# EAGLE library part SN74HC595DR (library SN74HC595DR)
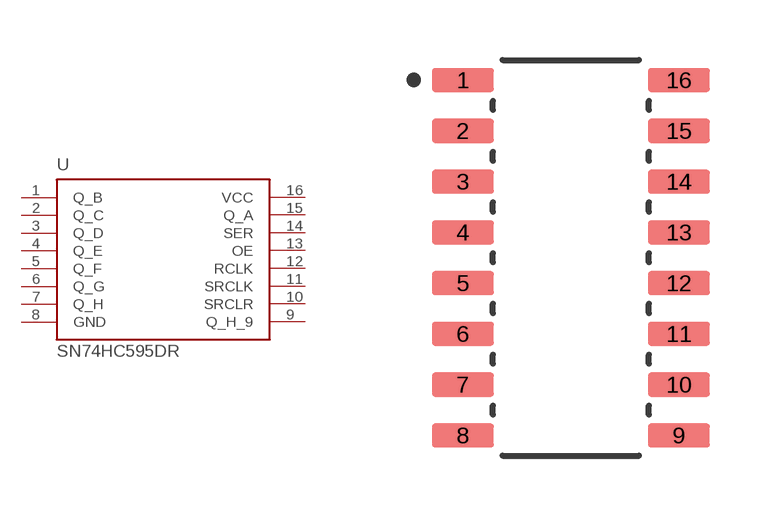
[diagram p0: symbol with the pads of C10092_SOIC-16; footprint C10092_SOIC-16]

Designator prefix U

## SN74HC595DR  [C10092_SOIC-16]
1  Q_B
2  Q_C
3  Q_D
4  Q_E
5  Q_F
6  Q_G
7  Q_H
8  GND
9  Q_H_9
10  SRCLR
11  SRCLK
12  RCLK
13  OE
14  SER
15  Q_A
16  VCC

## Footprint C10092_SOIC-16 (pad centres in mm)
SN74HC595DR — Clean-Room IPC-7351B / JEDEC MS-012-AC
smd 1.55 x 0.6: 1 -2.7,4.445; 2 -2.7,3.175; 3 -2.7,1.905; 4 -2.7,0.635; 5 -2.7,-0.635; 6 -2.7,-1.905; 7 -2.7,-3.175; 8 -2.7,-4.445; 9 2.7,-4.445; 10 2.7,-3.175; 11 2.7,-1.905; 12 2.7,-0.635; 13 2.7,0.635; 14 2.7,1.905; 15 2.7,3.175; 16 2.7,4.445